# Altium footprint library Connectors.PcbLib: 304 footprints (part 16 of 19)
Each footprint in its own frame and in the unit in brackets; x right, y up, seen from the top. Pads: shape width x height; smd on the part's side, far side on the other; paste and mask are expansions set on the pad; w line width, h text height; cw(c..) or ccw(c..) is an arc to the next point about the centre after c.
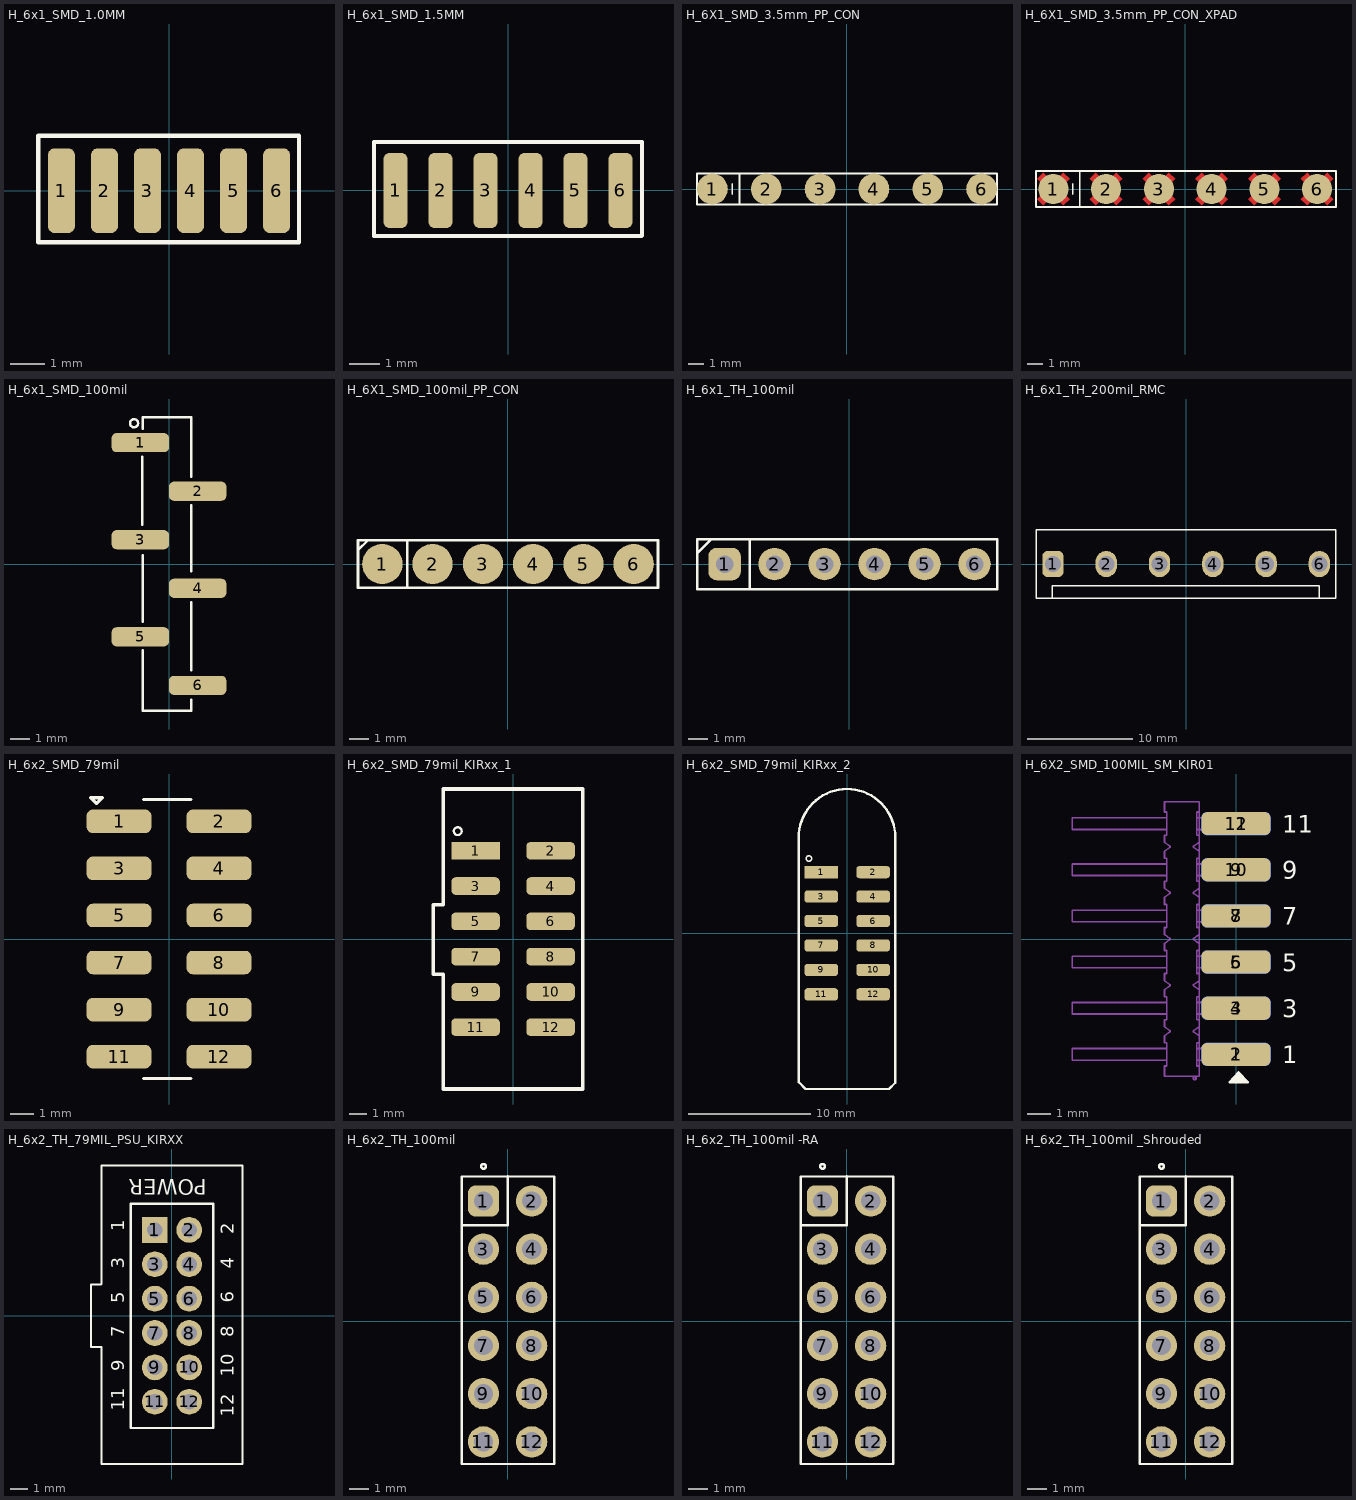
[diagram p15: the footprints below, top view; thin cyan lines are the x and y axes]

## H_6x1_SMD_1.0MM [mm] "/20210810/J-E.Pachon"
pads (6):
  rrect50% 0.8x2.5 smd: 1(-3.175,0) 2(-1.905,0) 3(-0.635,0) 4(0.635,0) 5(1.905,0) 6(3.175,0)
Top Overlay:
  lines w0.127: -3.861,-1.52 -3.861,1.62 3.835,1.62 3.835,-1.52 -3.861,-1.52

## H_6x1_SMD_1.5MM [mm] "/20210113/J-E.Pachon"
pads (6):
  rrect50% 0.8x2.5 smd: 1(-3.75,0) 2(-2.25,0) 3(-0.75,0) 4(0.75,0) 5(2.25,0) 6(3.75,0)
Top Overlay:
  lines w0.127: -4.47,-1.52 4.46,-1.52 4.47,-1.51 4.47,1.62 -4.47,1.62 -4.47,-1.52

## H_6X1_SMD_3.5mm_PP_CON [mm] "/ 20190222 / C-A.Serna.A"
pads (6):
  round 2 smd mask-0.2: 1(-8.75,0) 2(-5.25,0) 3(-1.75,0) 4(1.75,0) 5(5.25,0) 6(8.75,0)
Top Overlay:
  lines w0.127: -7.46,-0.34 -7.46,0.34 ; -9.742,-0.998 -9.742,0.998 9.75,0.998 9.75,-0.998 -9.742,-0.998 ; -7,-0.998 -6.98,0.998 -7,-0.998
3D body: height 0.1, standoff 0, extent 7.758,-0.998 9.75,0.998
3D body: height 0.1, standoff 0, extent 4.258,-0.998 6.25,0.998
3D body: height 0.1, standoff 0, extent 0.758,-0.998 2.75,0.998
3D body: height 0.1, standoff 0, extent -2.742,-0.998 -0.75,0.998
3D body: height 0.1, standoff 0, extent -6.242,-0.998 -4.25,0.998
3D body: height 0.1, standoff 0, extent -9.742,-0.998 -7.75,0.998

## H_6X1_SMD_3.5mm_PP_CON_XPAD [mm] "/ 20190923/ N-A. Potosi"
pads (6):
  round 2 smd mask-0.2: 1(-8.75,0) 2(-5.25,0) 3(-1.75,0) 4(1.75,0) 5(5.25,0) 6(8.75,0)
Top Layer:
  region: -8.078,-1.096 -7.654,-0.672 -9.422,1.096 -9.846,0.672
  region: -7.654,0.672 -8.078,1.096 -9.846,-0.672 -9.422,-1.096
  region: -4.578,-1.096 -4.154,-0.672 -5.922,1.096 -6.346,0.672
  region: -4.154,0.672 -4.578,1.096 -6.346,-0.672 -5.922,-1.096
  region: -1.078,-1.096 -0.654,-0.672 -2.422,1.096 -2.846,0.672
  region: -0.654,0.672 -1.078,1.096 -2.846,-0.672 -2.422,-1.096
  region: 2.422,-1.096 2.846,-0.672 1.078,1.096 0.654,0.672
  region: 2.846,0.672 2.422,1.096 0.654,-0.672 1.078,-1.096
  region: 5.922,-1.096 6.346,-0.672 4.578,1.096 4.154,0.672
  region: 6.346,0.672 5.922,1.096 4.154,-0.672 4.578,-1.096
  region: 9.422,-1.096 9.846,-0.672 8.078,1.096 7.654,0.672
  region: 9.846,0.672 9.422,1.096 7.654,-0.672 8.078,-1.096
Top Overlay:
  lines w0.127: -7.46,-0.34 -7.46,0.34 ; -9.9,-1.2 10,-1.2 10,1.2 -9.9,1.2 -9.9,-1.2 ; -7,-1.2 -7,1.2 -7,-1.2
3D body: height 0.1, standoff 0, extent -9.742,-0.998 -7.75,0.998
3D body: height 0.1, standoff 0, extent -6.242,-0.998 -4.25,0.998
3D body: height 0.1, standoff 0, extent -2.742,-0.998 -0.75,0.998
3D body: height 0.1, standoff 0, extent 0.758,-0.998 2.75,0.998
3D body: height 0.1, standoff 0, extent 4.258,-0.998 6.25,0.998
3D body: height 0.1, standoff 0, extent 7.758,-0.998 9.75,0.998

## H_6x1_SMD_100mil [mm] "/ 20190222 / C-A.Serna.A"
pads (6):
  rrect50% 3x1 smd: 1(-1.5,6.35) 2(1.5,3.81) 3(-1.5,1.27) 4(1.5,-1.27) 5(-1.5,-3.81) 6(1.5,-6.35)
Top Overlay:
  circle w0.127: c-1.829,7.366 r0.209
  lines w0.127: -1.397,2.057 -1.397,5.613 ; -1.372,-4.521 -1.372,-7.671 1.168,-7.671 1.168,-7.112 ; -1.372,-3.023 -1.372,-2.489 -1.372,0.457 ; -1.372,7.087 -1.372,7.671 1.168,7.671 1.168,4.572 ; 1.168,-5.563 1.168,-2.007 ; 1.168,-0.381 1.168,3.073

## H_6X1_SMD_100mil_PP_CON [mil] "/ 20190222 / C-A.Serna.A"
pads (6):
  round 80 smd: 1(-250,0) 2(-150,0) 3(-50,0) 4(50,0) 5(150,0) 6(250,0)
Top Overlay:
  lines w5: -298.03,27.95 -278.74,47.24 ; -200,-47.24 -200,47.24 ; -298.43,-47.24 298.43,-47.24 298.43,47.24 -298.43,47.24 -298.43,-47.24

## H_6x1_TH_100mil [mil] "/ 20190222 / C-A.Serna.A"
pads (6):
  rrect50% 65x65 hole 35: 1(-250,0)
  round 65 hole 35: 2(-150,0) 3(-50,0) 4(50,0) 5(150,0) 6(250,0)
Top Overlay:
  lines w5: -305,20.87 -275.87,50 ; -200,-50 -200,50 ; -305,-50 295,-50 295,50 -305,50 -305,-50

## H_6x1_TH_200mil_RMC [mil] "/ 20200321/ C-A.Serna.A"
pads (6):
  rrect50% 80x98.43 hole 60 unplated: 1(-500,0)
  oval 80x98.43 hole 60 unplated: 2(-300,0) 3(-100,0) 4(100,0) 5(300,0) 6(500,0)
Top Overlay:
  lines w5: -502.01,-128.66 -502.01,-81.11 500,-81.11 500,-128.66 ; -563.76,-128.66 562.38,-128.66 562.38,128.82 -563.76,128.82 -563.76,-128.66
3D body "010085061.stp": height 578.42, standoff -170.8, extent -560.05,-125 558.06,125
3D body "010011064.stp": height 762.99, standoff 137.01, extent -599,-81.11 601,155.11

## H_6x2_SMD_79mil [mm] "/ 20200722 /C-D Viveros"
pads (12):
  rrect50% 2.75x1 smd: 1(-2.125,5) 2(2.125,5) 3(-2.125,3) 4(2.125,3) 5(-2.125,1) 6(2.125,1) 7(-2.125,-1) 8(2.125,-1) 9(-2.125,-3) 10(2.125,-3) 11(-2.125,-5) 12(2.125,-5)
Top Overlay:
  lines w0.127: -1.075,-5.936 0.925,-5.936 ; -1.075,5.936 0.925,5.936
  lines w0.152: -3.088,5.77 -3.317,6 -2.838,6 -3.067,5.77 ; -3.088,5.77 -3.067,5.77 ; -3.088,5.77 -3.067,5.77
3D body "29817.stp": height 6.02, standoff 0.05, extent -3.299,2 3.249,6
3D body "29817.stp": height 6.02, standoff 0.05, extent -3.299,-2 3.249,2
3D body "29817.stp": height 6.02, standoff 0.05, extent -3.299,-6 3.249,-2

## H_6x2_SMD_79mil_KIRxx_1 [mm] "/20200429/V-A.Patino"
pads (12):
  rect 2.75x1 smd: 1(-2.125,5)
  rrect50% 2.75x1 smd: 2(2.125,5) 3(-2.125,3) 4(2.125,3) 5(-2.125,1) 6(2.125,1) 7(-2.125,-1) 8(2.125,-1) 9(-2.125,-3) 10(2.125,-3) 11(-2.125,-5) 12(2.125,-5)
Top Overlay:
  circle w0.127: c-3.134,6.111 r0.222
  lines w0.203: -4.52,-1.998 -4.52,1.939 -3.95,1.939 -3.95,8.5 3.95,8.5 3.95,-8.5 -3.95,-8.5 -3.95,-1.998 -4.52,-1.998
3D body "877591214.stp": height 6.51, standoff 0.01, extent -2.75,-5.95 2.75,5.95

## H_6x2_SMD_79mil_KIRxx_2 [mm] "/20200429/V-A.Patino"
pads (12):
  rect 2.75x1 smd: 1(-2.125,5)
  rrect50% 2.75x1 smd: 2(2.125,5) 3(-2.125,3) 4(2.125,3) 5(-2.125,1) 6(2.125,1) 7(-2.125,-1) 8(2.125,-1) 9(-2.125,-3) 10(2.125,-3) 11(-2.125,-5) 12(2.125,-5)
Top Overlay:
  circle w0.127: c-3.134,6.111 r0.222
  lines w0.203: 3.936,7.858 ccw(c-0.013,7.858) -3.963,7.858 -3.963,-12.19 -3.401,-12.752 3.426,-12.752 3.937,-12.241 3.937,7.858
3D body "877591214.stp": height 6.51, standoff 0.01, extent -2.75,-5.95 2.75,5.95

## H_6X2_SMD_100MIL_SM_KIR01 [mm] "/ C-A.Serna.A / 20190710"
pads (12):
  rrect50% 3x1 smd: 1(0,-5) 3(0,-3) 5(0,-1) 7(0,1) 9(0,3) 11(0,5)
  rrect50% 3x1 smd far side: 2(0,-5) 4(0,-3) 6(0,-1) 8(0,1) 10(0,3) 12(0,5)
Top Overlay:
  region: -0.264,-6.207 0.498,-6.207 0.102,-5.793
  lines w0.127: -0.264,-6.207 0.498,-6.207 0.102,-5.793 -0.264,-6.207
  text "11" at 2,4.613 h0.76
  text "9" at 2,2.613 h0.76
  text "7" at 2,0.613 h0.76
  text "5" at 2,-1.387 h0.76
  text "3" at 2,-3.387 h0.76
  text "1" at 2,-5.387 h0.76
Bottom Overlay:
  text "2" at 2.565,-5.407 h0.76
  text "4" at 2.565,-3.407 h0.76
  text "6" at 2.565,-1.407 h0.76
  text "8" at 2.565,0.593 h0.76
  text "10" at 3.2,2.593 h0.76
  text "12" at 3.2,4.593 h0.76
Mechanical 15:
  drawing of 219 lines, arcs and shapes, not listed
3D body "878301221.stp": height 2, standoff -2, extent -7,-5.95 1.1,5.95

## H_6x2_TH_79MIL_PSU_KIRXX [mm] "20190515 / V-A.Patino"
pads (12):
  rect 1.5x1.5 hole 0.889: 1(-1,5)
  round 1.5 hole 0.889: 2(1,5) 3(-1,3) 4(1,3) 5(-1,1) 6(1,1) 7(-1,-1) 8(1,-1) 9(-1,-3) 10(1,-3) 11(-1,-5) 12(1,-5)
Top Overlay:
  lines w0.127: -4.124,1.825 -4.708,1.825 -4.708,-1.807 -4.099,-1.807 ; -4.106,-1.807 -4.106,-8.623 4.08,-8.623 ; -4.106,1.85 -4.106,6.549 -4.106,8.747 4.105,8.747 4.105,-8.623 ; -2.4,-6.524 -2.4,6.524 ; -2.397,-6.524 2.4,-6.524 2.4,6.524 -0.365,6.524 ; -2.397,6.524 0.905,6.524
  text "9" at -2.778,-3.236 h0.76
  text "7" at -2.778,-1.254 h0.76
  text "5" at -2.778,0.746 h0.76
  text "3" at -2.778,2.746 h0.76
  text "12" at 3.597,-5.871 h0.76
  text "10" at 3.597,-3.533 h0.76
  text "8" at 3.597,-1.254 h0.76
  text "6" at 3.597,0.764 h0.76
  text "4" at 3.597,2.728 h0.76
  text "2" at 3.597,4.746 h0.76
  text "11" at -2.778,-5.516 h0.76
  text "1" at -2.778,4.909 h0.76
  text "POWER" at 2.023,7.946 h0.89
3D body "TMM-106-01-T-D-RA.stp": height 5.04, standoff -3.19, extent -1.902,-5.953 5.083,6.047

## H_6x2_TH_100mil [mil] "/ 20210811 / V-A.Patino"
pads (12):
  rrect50% 65x65 hole 40: 1(-50,250)
  round 65 hole 40: 2(50,250) 3(-50,150) 4(50,150) 5(-50,50) 6(50,50) 7(-50,-50) 8(50,-50) 9(-50,-150) 10(50,-150) 11(-50,-250) 12(50,-250)
Top Overlay:
  circle w5: c-50,322 r4.92
  lines w5: -95.19,200 0,200 0,301.5 ; -95.19,-296 97,-296 97,301 -95.19,301 -95.19,-296
3D body "s10129381-X12002XLF.stp": height 330.43, standoff -89.71, extent -95.19,-298.5 95.11,301.5

## H_6x2_TH_100mil -RA [mil] "/ 20221116 / J.Jaramillo"
pads (12):
  rrect50% 65x65 hole 40: 1(-50,250)
  round 65 hole 40: 2(50,250) 3(-50,150) 4(50,150) 5(-50,50) 6(50,50) 7(-50,-50) 8(50,-50) 9(-50,-150) 10(50,-150) 11(-50,-250) 12(50,-250)
Top Overlay:
  circle w5: c-50,322 r4.92
  lines w5: -95.19,200 0,200 0,301.5 ; -95.19,-296 97,-296 97,301 -95.19,301 -95.19,-296
3D body "s10129382-X12002XLF.stp": height 190.66, standoff -89.66, extent -439.37,-300 62.99,300

## H_6x2_TH_100mil _Shrouded [mil] "/ 20221122 / J.Jaramillo"
pads (12):
  rrect50% 65x65 hole 40: 1(-50,250)
  round 65 hole 40: 2(50,250) 3(-50,150) 4(50,150) 5(-50,50) 6(50,50) 7(-50,-50) 8(50,-50) 9(-50,-150) 10(50,-150) 11(-50,-250) 12(50,-250)
Top Overlay:
  circle w5: c-50,322 r4.92
  lines w5: -95.19,200 0,200 0,301.5 ; -95.19,-296 97,-296 97,301 -95.19,301 -95.19,-296
3D body "connector 12pin.stp": height 362.72, standoff -117.6, extent -60.7,-450.79 472.44,450.79